# Altium schematic symbol library GRF5604.SchLib: 1 symbol
Pins are listed as number, name and electrical type; pins without a type are passive.

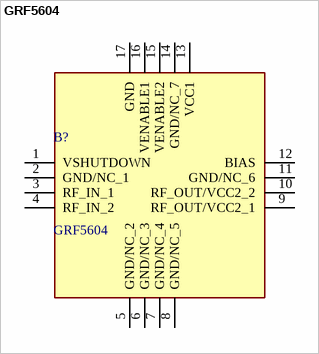
[diagram p0: symbol GRF5604]

## GRF5604
designator B?
Excellent OP1dB/PSAT 190 mA Native Mode Quiescent Current Consumption 5 V Supply Voltage 50  Single-Ended Input/Output Impedances Digital Shutdown -40 to 85 C Operating Temperature Range Compact 3 x 3 mm QFN-16 Package Process: InGaP HBT; Manufacturer_Name: Guerrilla RF; Geometry.Height: 0.9mm; Mouser Part Number: *; Mouser Price/Stock: *; Manufacturer_Part_Number: GRF5604; Datasheet Link: *
footprint QFN50P300X300X90-17N
pins: 1 VSHUTDOWN, 2 GND/NC_1, 3 RF_IN_1, 4 RF_IN_2, 5 GND/NC_2, 6 GND/NC_3, 7 GND/NC_4, 8 GND/NC_5, 9 RF_OUT/VCC2_1, 10 RF_OUT/VCC2_2, 11 GND/NC_6, 12 BIAS, 13 VCC1, 14 GND/NC_7, 15 VENABLE2, 16 VENABLE1, 17 GND